# Altium schematic symbol library BAS70-04LT1G.SchLib: 1 symbol
Pins are listed as number, name and electrical type; pins without a type are passive.

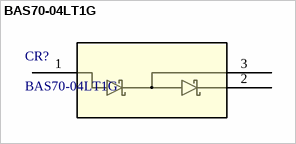
[diagram p0: symbol BAS70-04LT1G]

## BAS70-04LT1G
designator CR?
No Description Available; Manufacturer_Name: onsemi; Copyright: Copyright (C) 2026 Ultra Librarian. All rights reserved.; Manufacturer_Part_Number: BAS70-04LT1G; RefDes: RefDes; Type: Type
footprint SOT-23TO-236_318-08_ONS
pins: 1, 2, 3